# Altium footprint library footprints.PcbLib: 65 footprints (part 4 of 5)
Each footprint in its own frame and in the unit in brackets; x right, y up, seen from the top. Pads: shape width x height; smd on the part's side, far side on the other; paste and mask are expansions set on the pad; w line width, h text height; cw(c..) or ccw(c..) is an arc to the next point about the centre after c.
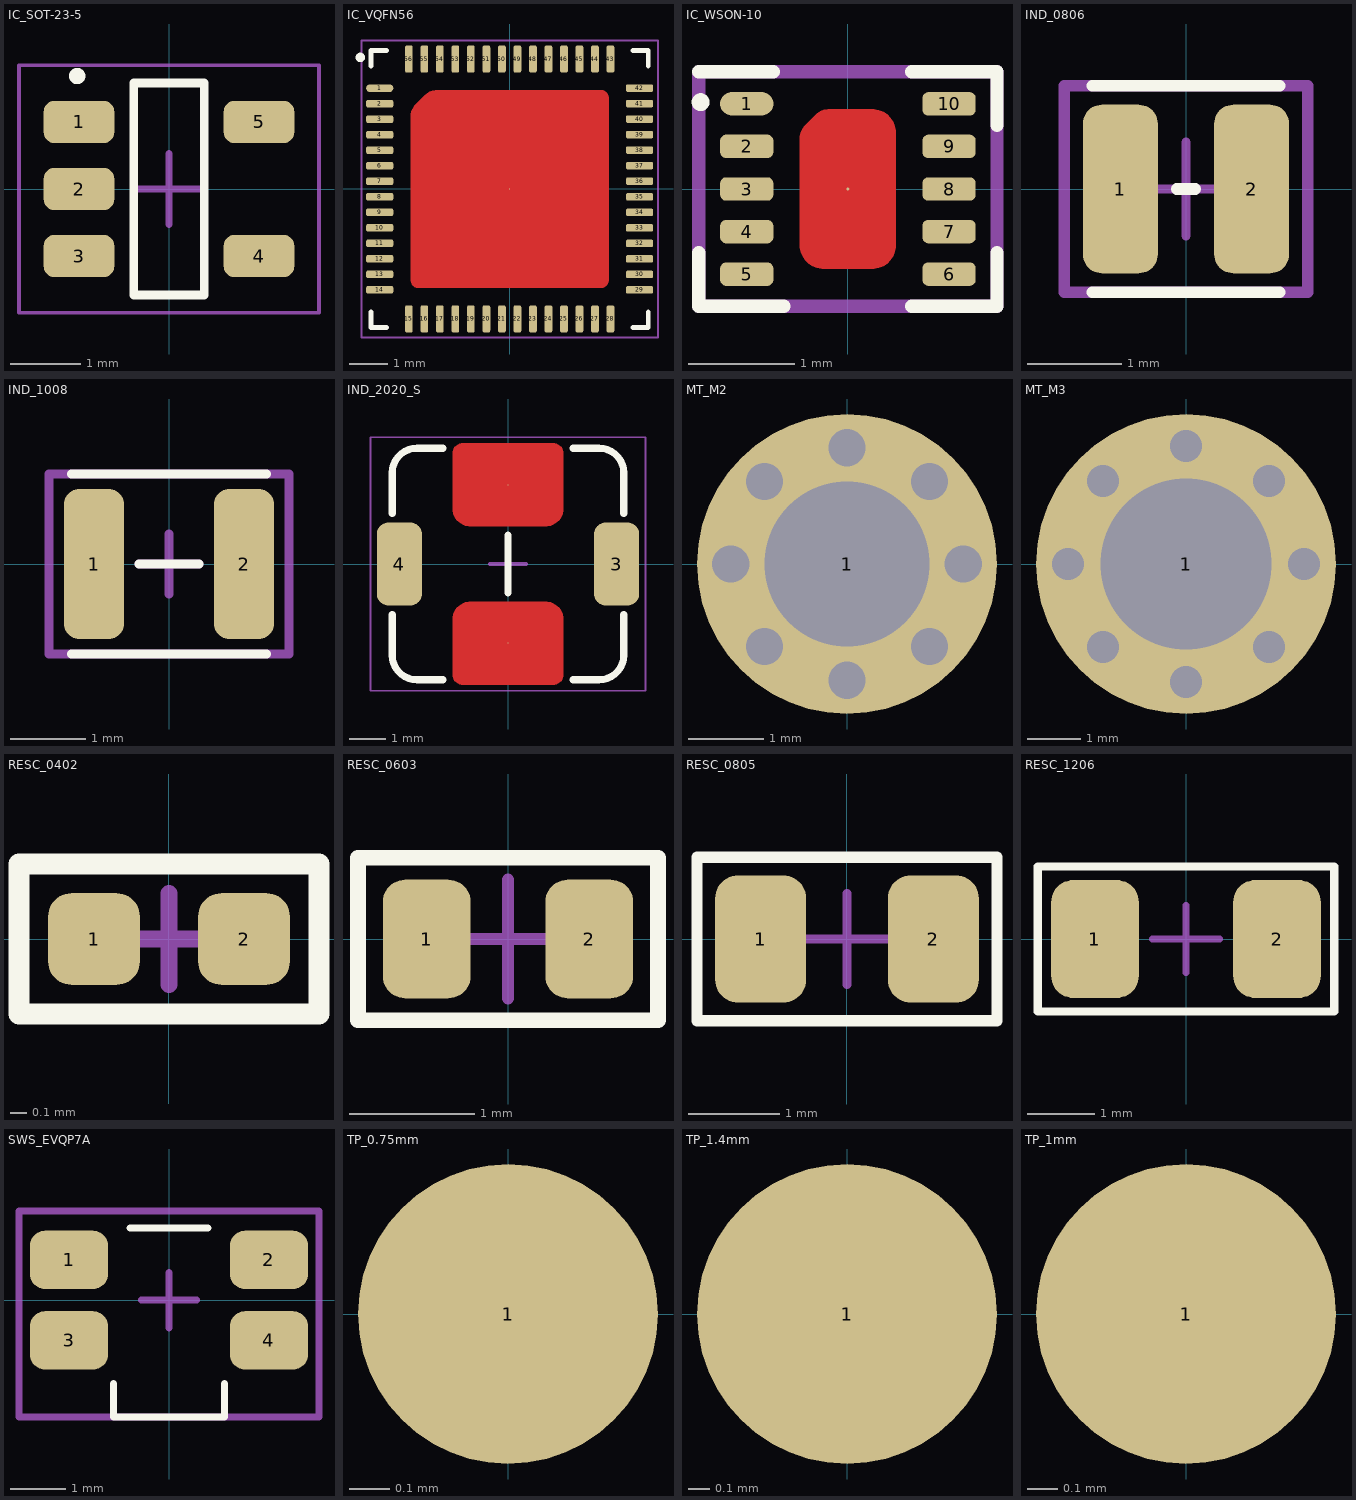
[diagram p3: the footprints below, top view; thin cyan lines are the x and y axes]

## IC_SOT-23-5 [mm] "SOT23, 5-Leads, Body 2,90x2,90mm, Pitch 0,95mm, IPC Medium Density"
height 1.45
pads (5):
  rrect50% 1x0.6 smd: 1(-1.275,0.95) 2(-1.275,0) 3(-1.275,-0.95) 4(1.275,-0.95) 5(1.275,0.95)
Top Overlay:
  circle w0.125: c-1.3,1.6 r0.053
  lines w0.125: -0.5,-1.5 0.5,-1.5 0.5,1.5 -0.5,1.5 -0.5,-1.5
Mechanical 15:
  lines w0.05: -2.125,-1.75 -2.125,1.75 2.125,1.75 2.125,-1.75 -2.125,-1.75
  lines w0.1: -0.5,0 0.5,0 ; 0,-0.5 0,0.5
3D body "SOT-25-5pin.stp": height 1.15, standoff -0.04, extent -1.4,-1.45 1.4,1.45

## IC_VQFN56 [mm] "VQFN, 56-Leads, Body 7,00x7,00mm, Pitch 0,40mm, Thermal Pad 5,28x5,28mm, IPC Medium Density"
height 1
pads (57):
  oval 0.7x0.2 smd: 1(-3.35,2.6)
  rrect50% 0.7x0.2 smd: 2(-3.35,2.2) 3(-3.35,1.8) 4(-3.35,1.4) 5(-3.35,1) 6(-3.35,0.6) 7(-3.35,0.2) 8(-3.35,-0.2) 9(-3.35,-0.6) 10(-3.35,-1) 11(-3.35,-1.4) 12(-3.35,-1.8) 13(-3.35,-2.2) 14(-3.35,-2.6) 29(3.35,-2.6) 30(3.35,-2.2) 31(3.35,-1.8) 32(3.35,-1.4) 33(3.35,-1) 34(3.35,-0.6) 35(3.35,-0.2) 36(3.35,0.2) 37(3.35,0.6) 38(3.35,1) 39(3.35,1.4) 40(3.35,1.8) 41(3.35,2.2) 42(3.35,2.6)
  rrect50% 0.2x0.7 smd: 15(-2.6,-3.35) 16(-2.2,-3.35) 17(-1.8,-3.35) 18(-1.4,-3.35) 19(-1,-3.35) 20(-0.6,-3.35) 21(-0.2,-3.35) 22(0.2,-3.35) 23(0.6,-3.35) 24(1,-3.35) 25(1.4,-3.35) 26(1.8,-3.35) 27(2.2,-3.35) 28(2.6,-3.35) 43(2.6,3.35) 44(2.2,3.35) 45(1.8,3.35) 46(1.4,3.35) 47(1,3.35) 48(0.6,3.35) 49(0.2,3.35) 50(-0.2,3.35) 51(-0.6,3.35) 52(-1,3.35) 53(-1.4,3.35) 54(-1.8,3.35) 55(-2.2,3.35) 56(-2.6,3.35)
  round 0.025 smd paste-2539.97: 57(0,0)
Top Layer:
  region: -2.55,1.879 -2.55,-2.35 -2.55,-2.37 -2.542,-2.408 -2.527,-2.445 -2.505,-2.477 -2.477,-2.505 -2.445,-2.527 -2.408,-2.542 -2.37,-2.55 -2.35,-2.55 2.35,-2.55 2.37,-2.55 2.408,-2.542 2.445,-2.527 2.477,-2.505 2.505,-2.477 2.527,-2.445 2.542,-2.408 2.55,-2.37 2.55,-2.35 2.55,2.35 2.55,2.37 2.542,2.408 2.527,2.445 2.505,2.477 2.477,2.505 2.445,2.527 2.408,2.542 2.37,2.55 2.35,2.55 -1.879,2.55 -1.92,2.55 -2,2.534 -2.075,2.503 -2.142,2.458 -2.171,2.429 -2.429,2.171 -2.458,2.142 -2.503,2.075 -2.534,1.999 -2.55,1.92
Top Overlay:
  circle w0.125: c-3.85,3.392 r0.06
  lines w0.125: -3.575,-3.175 -3.575,-3.575 -3.175,-3.575 ; -3.575,3.175 -3.575,3.575 -3.175,3.575 ; 3.175,-3.575 3.575,-3.575 3.575,-3.175 ; 3.175,3.575 3.575,3.575 3.575,3.175
Top Paste:
  drawing of 16 lines, arcs and shapes, not listed
Mechanical 15:
  lines w0.05: -3.825,-3.825 -3.825,3.825 3.825,3.825 3.825,-3.825 -3.825,-3.825
  lines w0.1: -0.5,0 0.5,0 ; 0,-0.5 0,0.5
3D body "VQFN56.step": height 1, standoff 0, extent -3.575,-3.575 3.575,3.575

## IC_WSON-10 [mm]
pads (11):
  oval 0.5x0.22 smd mask+0.05: 1(-0.95,0.8)
  rrect50% 0.5x0.22 smd mask+0.05: 2(-0.95,0.4) 3(-0.95,0) 4(-0.95,-0.4) 5(-0.95,-0.8) 6(0.95,-0.8) 7(0.95,-0.4) 8(0.95,0) 9(0.95,0.4) 10(0.95,0.8)
  round 0.025 smd paste-2539.97 mask+0.05: 11(0,0)
Top Layer:
  region: -0.45,-0.525 -0.45,0.479 -0.45,0.496 -0.443,0.529 -0.431,0.56 -0.412,0.588 -0.4,0.6 -0.306,0.694 -0.293,0.707 -0.261,0.728 -0.227,0.743 -0.19,0.75 -0.171,0.75 0.225,0.75 0.247,0.75 0.291,0.741 0.332,0.724 0.368,0.7 0.4,0.668 0.424,0.632 0.441,0.591 0.45,0.547 0.45,0.525 0.45,-0.525 0.45,-0.547 0.441,-0.591 0.424,-0.632 0.4,-0.668 0.368,-0.7 0.332,-0.724 0.291,-0.741 0.247,-0.75 0.225,-0.75 -0.225,-0.75 -0.247,-0.75 -0.291,-0.741 -0.332,-0.724 -0.368,-0.7 -0.4,-0.668 -0.424,-0.632 -0.441,-0.591 -0.45,-0.547
Top Overlay:
  circle w0.1: c-1.384,0.816 r0.034
  lines w0.125: -1.4,-0.6 -1.4,-1.1 -0.6,-1.1 ; -1.4,1.1 -0.7,1.1 ; 0.6,-1.1 1.4,-1.1 1.4,-0.6 ; 0.6,1.1 1.4,1.1 1.4,0.6
Top Paste:
  region: -0.2,0.6 0.2,0.6 0.24,0.6 0.313,0.57 0.37,0.513 0.4,0.44 0.4,0.4 0.4,-0.4 0.4,-0.44 0.37,-0.513 0.313,-0.57 0.24,-0.6 0.2,-0.6 -0.2,-0.6 -0.24,-0.6 -0.313,-0.57 -0.37,-0.513 -0.4,-0.44 -0.4,-0.4 -0.4,0.4 -0.4,0.44 -0.37,0.513 -0.313,0.57 -0.24,0.6
Mechanical 15:
  lines w0.125: -0.2,0 0,0 ; 0,-0.2 0,0 ; 0,0.2 0,0 ; 0.2,0 0,0 ; -1.4,-1.1 -1.4,1.1 1.4,1.1 1.4,-1.1 -1.4,-1.1
3D body "TLV75201PDSQT.stp": height 0.8, standoff 0, extent -1.05,-1 1.05,1

## IND_0806 [mm]
pads (2):
  rrect50% 0.8x1.8 smd: 1(-0.7,0) 2(0.7,0)
Top Overlay:
  lines w0.125: -1,-1.1 0,-1.1 1,-1.1 ; -1,1.1 0,1.1 1,1.1 ; -0.1,0 0.1,0
Mechanical 15:
  lines w0.1: -0.5,0 0.5,0 ; 0,-0.5 0,0.5
  lines w0.125: -1.3,-1.1 1.3,-1.1 1.3,1.1 -1.3,1.1 -1.3,-1.1
3D body "IND_2R2M01_VIS.step": height 1.19, standoff 0, extent -1.054,-0.851 1.054,0.851

## IND_1008 [mm]
pads (2):
  rrect50% 0.8x2 smd: 1(-1,0) 2(1,0)
Top Overlay:
  lines w0.125: -1.3,-1.2 1.3,-1.2 ; -1.3,1.2 1.3,1.2 ; -0.4,0 0.4,0
Mechanical 15:
  lines w0.125: -0.4,0 0,0 ; 0,-0.4 0,0 ; 0,0.4 0,0 ; 0,0 0.4,0 0,0 ; -1.6,-1.2 -1.6,0.3 -1.6,1.2 1.6,1.2 1.6,-1.2 -1.6,-1.2
3D body: height 1.2, standoff 0.01, extent -1.25,-1 1.25,1

## IND_2020_S [mm]
pads (4):
  round 0.025 smd: 1(0,2.185) 2(0,-2.185)
  rrect50% 1.25x2.29 smd: 3(3,0) 4(-3,0)
Top Layer:
  region: -1.525,3.075 -1.525,1.525 -1.525,1.477 -1.506,1.384 -1.47,1.295 -1.417,1.216 -1.349,1.148 -1.27,1.095 -1.181,1.059 -1.088,1.04 -1.04,1.04 1.04,1.04 1.088,1.04 1.181,1.059 1.27,1.095 1.349,1.148 1.417,1.216 1.47,1.295 1.506,1.384 1.525,1.477 1.525,1.525 1.525,3.075 1.525,3.1 1.515,3.149 1.496,3.196 1.468,3.238 1.433,3.273 1.391,3.301 1.344,3.32 1.295,3.33 1.27,3.33 -1.27,3.33 -1.295,3.33 -1.344,3.32 -1.391,3.301 -1.433,3.273 -1.468,3.238 -1.496,3.196 -1.515,3.149 -1.525,3.1
  region: 1.525,-3.075 1.525,-1.525 1.525,-1.477 1.506,-1.384 1.47,-1.295 1.417,-1.216 1.349,-1.148 1.27,-1.095 1.181,-1.059 1.088,-1.04 1.04,-1.04 -1.04,-1.04 -1.088,-1.04 -1.181,-1.059 -1.27,-1.095 -1.349,-1.148 -1.417,-1.216 -1.47,-1.295 -1.506,-1.384 -1.525,-1.477 -1.525,-1.525 -1.525,-3.075 -1.525,-3.1 -1.515,-3.149 -1.496,-3.196 -1.468,-3.238 -1.433,-3.273 -1.391,-3.301 -1.344,-3.32 -1.295,-3.33 -1.27,-3.33 1.27,-3.33 1.295,-3.33 1.344,-3.32 1.391,-3.301 1.433,-3.273 1.468,-3.238 1.496,-3.196 1.515,-3.149 1.525,-3.1
Top Overlay:
  lines w0.2: -3.2,-1.4 -3.2,-2.517 ccw(c-2.517,-2.517) -2.517,-3.2 -1.8,-3.2 ; -3.2,1.4 -3.2,2.517 cw(c-2.517,2.517) -2.517,3.2 -1.8,3.2 ; 0,-0.8 0,0 0,0.8 ; 1.8,-3.2 2.517,-3.2 ccw(c2.517,-2.517) 3.2,-2.517 3.2,-1.4 ; 1.8,3.2 2.517,3.2 cw(c2.517,2.517) 3.2,2.517 3.2,1.4
Mechanical 15:
  lines w0.05: -3.8,-3.5 -3.8,3.5 3.8,3.5 3.8,-3.5 -3.8,-3.5
  lines w0.1: -0.5,0 0.5,0 ; 0,-0.5 0,0.5
3D body: height 3.25, standoff 0, extent -3,-3 3,3

## MT_M2 [mm]
pads (1):
  round 4 hole 2.2: 1(0,0)
via 0,-1.55 diameter 0.75 hole 0.5
via -1.1,-1.1 diameter 0.75 hole 0.5
via 0,1.55 diameter 0.75 hole 0.5
via -1.55,0 diameter 0.75 hole 0.5
via 1.55,0 diameter 0.75 hole 0.5
via 1.1,1.1 diameter 0.75 hole 0.5
via 1.1,-1.1 diameter 0.75 hole 0.5
via -1.1,1.1 diameter 0.75 hole 0.5

## MT_M3 [mm]
pads (1):
  round 5.6 hole 3.2: 1(0,0)
via -1.55,1.55 diameter 1 hole 0.6
via 2.2,0 diameter 1 hole 0.6
via 0,2.2 diameter 1 hole 0.6
via -1.55,-1.55 diameter 1 hole 0.6
via 1.55,-1.55 diameter 1 hole 0.6
via 1.55,1.55 diameter 1 hole 0.6
via 0,-2.2 diameter 1 hole 0.6
via -2.2,0 diameter 1 hole 0.6

## RESC_0402 [mm] "Chip Resistor, 2-Leads, Body 1,00x0,50mm, IPC Medium Density"
height 0.37
pads (2):
  rrect50% 0.55x0.55 smd: 1(-0.45,0) 2(0.45,0)
Top Overlay:
  lines w0.125: -0.9,-0.45 -0.9,0.45 0.9,0.45 0.9,0 0.9,-0.45 -0.9,-0.45
Mechanical 15:
  lines w0.05: -0.9,-0.45 0.9,-0.45 0.9,0.45 -0.9,0.45 -0.9,-0.45
  lines w0.1: -0.275,0 0.275,0 ; 0,-0.275 0,0.275
3D body "RESC1005X04N.step": height 0.37, standoff 0, extent -0.525,-0.275 0.525,0.275

## RESC_0603 [mm] "Chip Resistor, 2-Leads, Body 1,55x0,85mm, IPC Medium Density"
height 0.55
pads (2):
  rrect50% 0.7x0.95 smd: 1(-0.65,0) 2(0.65,0)
Top Overlay:
  lines w0.125: -1.2,-0.65 1.2,-0.65 1.2,0.65 -1.2,0.65 -1.2,-0.65
Mechanical 15:
  lines w0.05: -1.2,-0.65 -1.2,0.65 1.2,0.65 1.2,-0.65 -1.2,-0.65
  lines w0.1: -0.475,0 0.475,0 ; 0,-0.475 0,0.475
3D body "RESC1608X06N.step": height 0.55, standoff 0, extent -0.8,-0.475 0.8,0.475

## RESC_0805 [mm] "Chip Resistor, 2-Leads, Body 2,00x1,25mm, IPC Medium Density"
height 0.55
pads (2):
  rrect50% 1x1.4 smd: 1(-0.95,0) 2(0.95,0)
Top Overlay:
  lines w0.125: -1.65,-0.9 -1.65,0.9 1.65,0.9 1.65,-0.9 -1.65,-0.9
Mechanical 15:
  lines w0.05: -1.65,-0.9 -1.65,0.9 1.65,0.9 1.65,-0.9 -1.65,-0.9
  lines w0.1: -0.5,0 0.5,0 ; 0,-0.5 0,0.5
3D body "RESC2012X06N.step": height 0.55, standoff 0, extent -1.05,-0.7 1.05,0.7

## RESC_1206 [mm] "Chip Resistor, 2-Leads, Body 3,10x1,60mm, IPC Medium Density"
height 0.65
pads (2):
  rrect50% 1.3x1.75 smd: 1(-1.35,0) 2(1.35,0)
Top Overlay:
  lines w0.125: -2.2,-1.075 2.2,-1.075 2.2,1.075 -2.2,1.075 -2.2,-1.075
Mechanical 15:
  lines w0.05: -2.2,-1.075 2.2,-1.075 2.2,1.075 -2.2,1.075 -2.2,-1.075
  lines w0.1: -0.5,0 0.5,0 ; 0,-0.5 0,0.5
3D body "RESC3116X06N.step": height 0.65, standoff 0, extent -1.65,-0.875 1.65,0.875

## SWS_EVQP7A [mm]
pads (4):
  rrect50% 1.4x1.05 smd: 1(-1.8,0.725) 2(1.8,0.725) 3(-1.8,-0.725) 4(1.8,-0.725)
Top Overlay:
  lines w0.125: -1,-1.5 -1,-2.1 1,-2.1 1,-1.5 ; -0.7,1.3 0.7,1.3
Mechanical 15:
  lines w0.125: -0.5,0 0,0 ; 0,-0.5 0,0 ; 0,0.5 0,0 ; 0.5,0 0,0 ; -2.7,-2.1 -2.7,1.6 2.7,1.6 2.7,-2.1 -2.7,-2.1
3D body "EVQ-P7A01P.stp": height 1.35, standoff 0, extent -2.35,-2.1 2.35,1.45

## TP_0.75mm [mm]
pads (1):
  round 0.75 smd paste-2539.97 mask+0.025: 1(0,0)

## TP_1.4mm [mm]
pads (1):
  round 1.4 smd paste-2539.97 mask+0.025: 1(0,0)

## TP_1mm [mm]
pads (1):
  round 1 smd paste-2539.97 mask+0.025: 1(0,0)